# EAGLE library part 6100XX243021_610032243021 (library WR-PHD)
WR-PHD 2.54 mm SMT Dual Socket Header Bottom Entry Article Properties Pins 4 unitless; 6 unitless; 8 unitless; 10 unitless; 12 unitless; 16 unitless; 18 unitless; 20 unitless; 22 unitless; 24 unitless; 26 unitless; 32 unitless; 34 unitless; 40 unitless General Information Operating Temperature -40 °C up to +125 °C Compliance Lead free / RoHS Pitch 2.54 mm Durability 25 Mating cycles Rows Dual Gender Socket Header Type Bottom Entry Large Material Properties Insulator Material PA6T; PA9T Insulator Flammability Rating UL94 V-0 Contact Material Copper Alloy; Phosphor Bronze Contact Plating Gold Contact Type Stamped Certification UL Approval E323964 Packaging Properties Packaging Tape and Reel with Cap; Tube Electrical Properties IR 3 A Withstanding Voltage 500 V (AC); 600 V (AC) Contact Resistance 20 mΩ RISO 1000 MΩ <https://www.we-online.com/components/media/o33207v209%20Family_WR-PHD_610xxx243021.jpg> Details see: www.we-online.com/en/components/products/PHD_2_54_SMT_DUAL_SOCKET_HEADER_BOTTOM_ENTRY_6100XX243021 <www.we-online.com/catalog/PHD_2_54_SMT_DUAL_SOCKET_HEADER_BOTTOM_ENTRY_6100XX243021/?utm_source=eagle_model&utm_medium=description_link&utm_campaign=eisos_eagle> Updated by Ella Wu 2021-12-08 2021 (C) Würth Elektronik
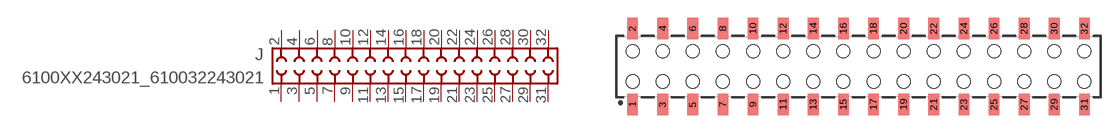
[diagram p240: symbol with the pads of 610032243021; footprint 610032243021]

Designator prefix J

## 6100XX243021_610032243021 (DATASHEET-URL: https://www.we-online.com/redexpert/spec/610032243021?ae; GENDER: Socket Header; IR: 3A; MOUNT: SMT; PACKAGING: Tube; PART-NUMBER: 610032243021; PINS: 32; PITCH: 2.54 mm; ROWS: Dual; TYPE: Bottom Entry Low Profile; VALUE: 610032243021)  [610032243021]
1  1  pas
2  2  pas
3  3  pas
4  4  pas
5  5  pas
6  6  pas
7  7  pas
8  8  pas
9  9  pas
10  10  pas
11  11  pas
12  12  pas
13  13  pas
14  14  pas
15  15  pas
16  16  pas
17  17  pas
18  18  pas
19  19  pas
20  20  pas
21  21  pas
22  22  pas
23  23  pas
24  24  pas
25  25  pas
26  26  pas
27  27  pas
28  28  pas
29  29  pas
30  30  pas
31  31  pas
32  32  pas

## Footprint 610032243021 (pad centres in mm)
WR-PHD 2.54 mm SMT Dual Socket Header Bottom Entry, 32 Pins
smd 0.9 x 1.8: 1 -19.05,-3.2; 2 -19.05,3.2; 3 -16.51,-3.2; 4 -16.51,3.2; 5 -13.97,-3.2; 6 -13.97,3.2; 7 -11.43,-3.2; 8 -11.43,3.2; 9 -8.89,-3.2; 10 -8.89,3.2; 11 -6.35,-3.2; 12 -6.35,3.2; 13 -3.81,-3.2; 14 -3.81,3.2; 15 -1.27,-3.2; 16 -1.27,3.2; 17 1.27,-3.2; 18 1.27,3.2; 19 3.81,-3.2; 20 3.81,3.2; 21 6.35,-3.2; 22 6.35,3.2; 23 8.89,-3.2; 24 8.89,3.2; 25 11.43,-3.2; 26 11.43,3.2; 27 13.97,-3.2; 28 13.97,3.2; 29 16.51,-3.2; 30 16.51,3.2; 31 19.05,-3.2; 32 19.05,3.2
hole 1.1 at -19.05,1.27
hole 1.1 at -16.51,1.27
hole 1.1 at -16.51,-1.27
hole 1.1 at -19.05,-1.27
hole 1.1 at -13.97,1.27
hole 1.1 at -13.97,-1.27
hole 1.1 at -11.43,1.27
hole 1.1 at -11.43,-1.27
hole 1.1 at -8.89,-1.27
hole 1.1 at -8.89,1.27
hole 1.1 at -6.35,1.27
hole 1.1 at -6.35,-1.27
hole 1.1 at -3.81,-1.27
hole 1.1 at -3.81,1.27
hole 1.1 at -1.27,1.27
hole 1.1 at -1.27,-1.27
hole 1.1 at 1.27,1.27
hole 1.1 at 1.27,-1.27
hole 1.1 at 3.81,1.27
hole 1.1 at 3.81,-1.27
hole 1.1 at 6.35,1.27
hole 1.1 at 6.35,-1.27
hole 1.1 at 8.89,-1.27
hole 1.1 at 8.89,1.27
hole 1.1 at 11.43,1.27
hole 1.1 at 11.43,-1.27
hole 1.1 at 13.97,1.27
hole 1.1 at 13.97,-1.27
hole 1.1 at 16.51,-1.27
hole 1.1 at 16.51,1.27
hole 1.1 at 19.05,1.27
hole 1.1 at 19.05,-1.27